# Altium footprint library bspd.PcbLib: 19 footprints (part 1 of 2)
Each footprint in its own frame and in the unit in brackets; x right, y up, seen from the top. Pads: shape width x height; smd on the part's side, far side on the other; paste and mask are expansions set on the pad; w line width, h text height; cw(c..) or ccw(c..) is an arc to the next point about the centre after c.
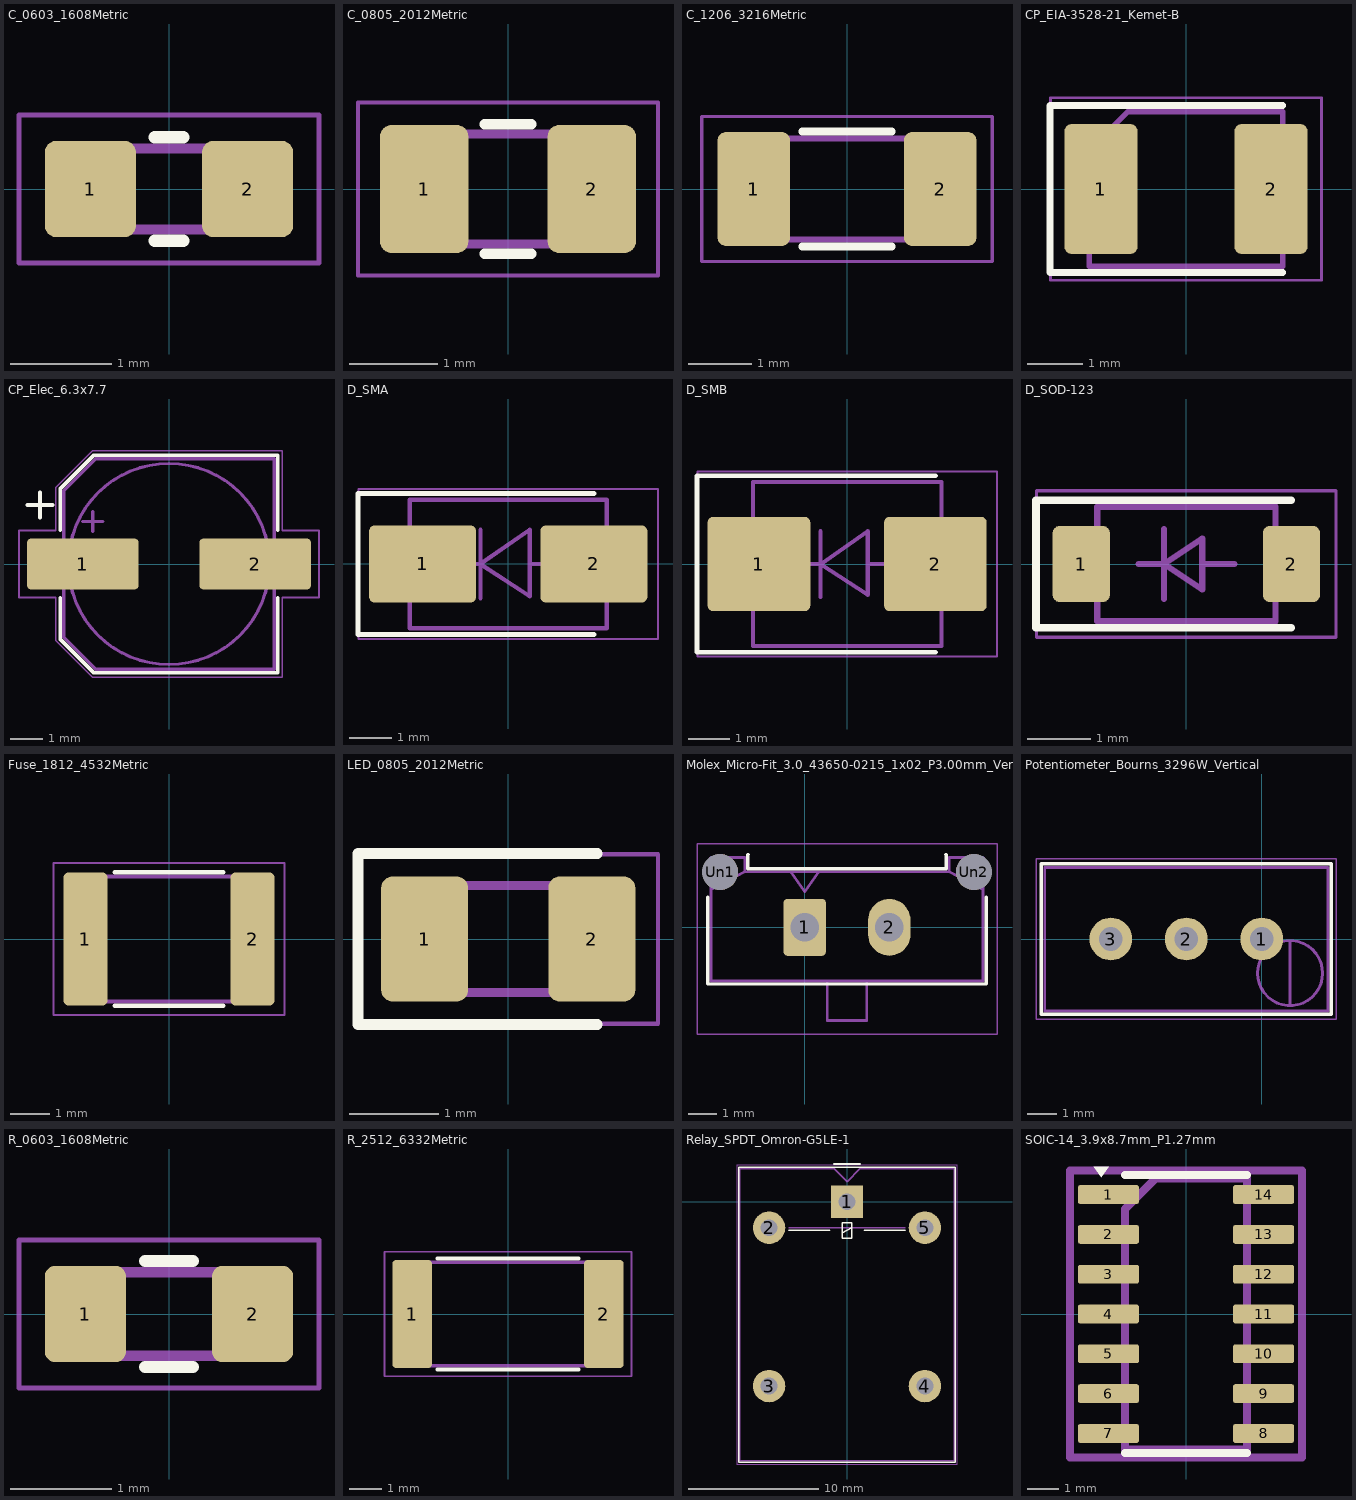
[diagram p0: the footprints below, top view; thin cyan lines are the x and y axes]

## C_0603_1608Metric [mm]
pads (2):
  rrect25% 0.9x0.95 smd: 1(-0.775,0) 2(0.775,0)
F.SilkS:
  lines w0.12: -0.141,-0.51 0.141,-0.51 ; -0.141,0.51 0.141,0.51
F.Fab:
  lines w0.1: -0.8,-0.4 0.8,-0.4 0.8,0.4 -0.8,0.4 -0.8,-0.4
  text "'.Designator'" at -0.963,-0.165 h0.4
F.CrtYd:
  lines w0.05: -1.48,-0.73 -1.48,0.73 1.48,0.73 1.48,-0.73 -1.48,-0.73

## C_0805_2012Metric [mm]
pads (2):
  rrect25% 1x1.45 smd: 1(-0.95,0) 2(0.95,0)
F.SilkS:
  lines w0.12: -0.261,-0.735 0.261,-0.735 ; -0.261,0.735 0.261,0.735
F.Fab:
  lines w0.1: -1,-0.625 -1,0.625 1,0.625 1,-0.625 -1,-0.625
  text "'.Designator'" at -1.209,-0.207 h0.5
F.CrtYd:
  lines w0.05: -1.7,-0.98 1.7,-0.98 1.7,0.98 -1.7,0.98 -1.7,-0.98

## C_1206_3216Metric [mm]
pads (2):
  rrect22% 1.15x1.8 smd: 1(-1.475,0) 2(1.475,0)
F.SilkS:
  lines w0.12: -0.711,-0.91 0.711,-0.91 ; -0.711,0.91 0.711,0.91
F.Fab:
  lines w0.1: -1.6,-0.8 1.6,-0.8 1.6,0.8 -1.6,0.8 -1.6,-0.8
  text "'.Designator'" at -1.932,-0.331 h0.8
F.CrtYd:
  lines w0.05: -2.3,-1.15 -2.3,1.15 2.3,1.15 2.3,-1.15 -2.3,-1.15

## CP_EIA-3528-21_Kemet-B [mm]
pads (2):
  rrect19% 1.325x2.35 smd: 1(-1.538,0) 2(1.538,0)
F.SilkS:
  lines w0.12: 1.75,-1.51 -2.46,-1.51 -2.46,1.51 1.75,1.51
F.Fab:
  lines w0.1: -1.75,-1.4 -1.75,0.7 -1.05,1.4 1.75,1.4 1.75,-1.4 -1.75,-1.4
  text "'.Designator'" at -2.125,-0.364 h0.88
F.CrtYd:
  lines w0.05: -2.45,-1.65 -2.45,1.65 2.45,1.65 2.45,-1.65 -2.45,-1.65

## CP_Elec_6.3x7.7 [mm]
pads (2):
  rrect16% 3.5x1.6 smd: 1(-2.7,0) 2(2.7,0)
F.SilkS:
  lines w0.12: -4.437,1.847 -3.65,1.847 ; -4.044,1.454 -4.044,2.241 ; -3.41,-1.06 -3.41,-2.346 -2.346,-3.41 3.41,-3.41 3.41,-1.06 ; -3.41,1.06 -3.41,2.346 -2.346,3.41 3.41,3.41 3.41,1.06
F.Fab:
  circle w0.1: c0,0 r3.15
  lines w0.1: -2.705,1.33 -2.075,1.33 ; -2.39,1.015 -2.39,1.645 ; -3.3,-2.3 -2.3,-3.3 3.3,-3.3 3.3,3.3 -2.3,3.3 -3.3,2.3 -3.3,-2.3
  text "'.Designator'" at -2.417,-0.414 h1
F.CrtYd:
  lines w0.05: -4.7,-1.05 -4.7,1.05 -3.55,1.05 -3.55,2.4 -2.4,3.55 3.55,3.55 3.55,1.05 4.7,1.05 4.7,-1.05 3.55,-1.05 3.55,-3.55 -2.4,-3.55 -3.55,-2.4 -3.55,-1.05 -4.7,-1.05

## D_SMA [mm]
pads (2):
  rrect14% 2.5x1.8 smd: 1(-2,0) 2(2,0)
F.SilkS:
  lines w0.12: 2,-1.65 -3.51,-1.65 -3.51,1.65 2,1.65
F.Fab:
  lines w0.1: -1.551,-0.001 -0.649,-0.001 ; -0.649,-0.801 -0.649,0.799 ; 0.501,-0.001 1.499,-0.001 ; -0.649,-0.001 0.501,-0.75 0.501,0.799 -0.649,-0.001 ; -2.3,-1.5 2.3,-1.5 2.3,1.5 -2.3,1.5 -2.3,-1.5
  text "'.Designator'" at -2.417,2.086 h1
F.CrtYd:
  lines w0.05: -3.5,-1.75 -3.5,1.75 3.5,1.75 3.5,-1.75 -3.5,-1.75

## D_SMB [mm]
pads (2):
  rrect11% 2.5x2.3 smd: 1(-2.15,0) 2(2.15,0)
F.SilkS:
  lines w0.12: 2.15,-2.15 -3.66,-2.15 -3.66,2.15 2.15,2.15
F.Fab:
  lines w0.1: -1.551,-0.001 -0.649,-0.001 ; -0.649,-0.801 -0.649,0.799 ; 0.501,-0.001 1.499,-0.001 ; -0.649,-0.001 0.501,0.799 0.501,-0.75 -0.649,-0.001 ; -2.3,-2 -2.3,2 2.3,2 2.3,-2 -2.3,-2
  text "'.Designator'" at -2.417,2.586 h1
F.CrtYd:
  lines w0.05: -3.65,-2.25 -3.65,2.25 3.65,2.25 3.65,-2.25 -3.65,-2.25

## D_SOD-123 [mm]
pads (2):
  rrect25% 0.9x1.2 smd: 1(-1.65,0) 2(1.65,0)
F.SilkS:
  lines w0.12: 1.65,-1 -2.36,-1 -2.36,1 1.65,1
F.Fab:
  lines w0.1: -0.75,0 -0.35,0 ; -0.35,-0.55 -0.35,0 ; -0.35,0.55 -0.35,0 ; 0.25,0 0.75,0 ; -0.35,0 0.25,0.4 0.25,-0.4 -0.35,0 ; -1.4,-0.9 -1.4,0.9 1.4,0.9 1.4,-0.9 -1.4,-0.9
  text "'.Designator'" at -2.417,1.586 h1
F.CrtYd:
  lines w0.05: -2.35,-1.15 2.35,-1.15 2.35,1.15 -2.35,1.15 -2.35,-1.15

## Fuse_1812_4532Metric [mm]
pads (2):
  rrect22% 1.125x3.4 smd: 1(-2.137,0) 2(2.137,0)
F.SilkS:
  lines w0.12: -1.386,-1.71 1.386,-1.71 ; -1.386,1.71 1.386,1.71
F.Fab:
  lines w0.1: -2.25,-1.6 2.25,-1.6 2.25,1.6 -2.25,1.6 -2.25,-1.6
  text "'.Designator'" at -2.417,-0.414 h1
F.CrtYd:
  lines w0.05: -2.95,-1.95 2.95,-1.95 2.95,1.95 -2.95,1.95 -2.95,-1.95

## LED_0805_2012Metric [mm]
pads (2):
  rrect25% 0.975x1.4 smd: 1(-0.937,0) 2(0.937,0)
F.SilkS:
  lines w0.12: 1,-0.96 -1.685,-0.96 -1.685,0.96 1,0.96
F.Fab:
  lines w0.1: -1,-0.6 1,-0.6 1,0.6 -0.7,0.6 -1,0.3 -1,-0.6
  text "'.Designator'" at -1.209,-0.207 h0.5
F.CrtYd:
  lines w0.05: -1.68,-0.95 -1.68,0.95 1.68,0.95 1.68,-0.95 -1.68,-0.95

## Molex_Micro-Fit_3.0_43650-0215_1x02_P3.00mm_Vertical [mm]
pads (4):
  rrect17% 1.5x2.02 hole 1.02: 1(0,0)
  rrect100% 1.5x2.02 hole 1.02: 2(3,0)
  round 1.27 hole 1.27: Un1(-3,1.96) Un2(6,1.96)
F.SilkS:
  lines w0.12: -3.435,1.065 -3.435,-2.01 6.435,-2.01 6.435,1.065 ; -1.995,2.58 -2.015,2.58 -2.015,2.08 5.015,2.08 5.015,2.58 4.995,2.58
F.Fab:
  lines w0.1: -3.325,1.34 -2.125,1.97 ; -0.5,1.97 0,1.263 0.5,1.97 ; 0.8,-1.9 0.8,-3.3 2.2,-3.3 2.2,-1.9 ; 6.325,1.34 5.125,1.97 ; -2.125,1.97 5.125,1.97 ; -2.125,1.97 -2.125,2.47 -3.325,2.47 -3.325,-1.9 6.325,-1.9 6.325,2.47 5.125,2.47 5.125,1.97
  text "'.Designator'" at -0.917,-1.614 h1
F.CrtYd:
  lines w0.05: -3.82,-3.8 -3.82,2.97 6.82,2.97 6.82,-3.8 -3.82,-3.8

## Potentiometer_Bourns_3296W_Vertical [mm]
pads (3):
  round 1.44 hole 0.8: 1(0,0) 2(-2.54,0) 3(-5.08,0)
F.SilkS:
  lines w0.12: -7.425,-2.54 -7.425,2.53 2.345,2.53 2.345,-2.54 -7.425,-2.54
F.Fab:
  circle w0.1: c0.955,-1.15 r1.095
  lines w0.1: -7.305,-2.42 -7.305,2.41 2.225,2.41 2.225,-2.42 -7.305,-2.42 ; 0.955,-2.235 0.956,-0.066 0.955,-2.235
  text "'.Designator'" at -5.592,-0.419 h1
F.CrtYd:
  lines w0.05: -7.6,-2.7 2.5,-2.7 2.5,2.7 -7.6,2.7 -7.6,-2.7

## R_0603_1608Metric [mm]
pads (2):
  rrect25% 0.8x0.95 smd: 1(-0.825,0) 2(0.825,0)
F.SilkS:
  lines w0.12: -0.237,-0.523 0.237,-0.523 ; -0.237,0.523 0.237,0.523
F.Fab:
  lines w0.1: -0.8,-0.413 0.8,-0.413 0.8,0.413 -0.8,0.413 -0.8,-0.413
  text "'.Designator'" at -0.963,-0.165 h0.4
F.CrtYd:
  lines w0.05: -1.48,-0.73 -1.48,0.73 1.48,0.73 1.48,-0.73 -1.48,-0.73

## R_2512_6332Metric [mm]
pads (2):
  rrect20% 1.225x3.35 smd: 1(-2.963,0) 2(2.963,0)
F.SilkS:
  lines w0.12: -2.177,-1.71 2.177,-1.71 ; -2.177,1.71 2.177,1.71
F.Fab:
  lines w0.1: -3.15,-1.6 3.15,-1.6 3.15,1.6 -3.15,1.6 -3.15,-1.6
  text "'.Designator'" at -2.417,-0.414 h1
F.CrtYd:
  lines w0.05: -3.82,-1.92 -3.82,1.92 3.82,1.92 3.82,-1.92 -3.82,-1.92

## Relay_SPDT_Omron-G5LE-1 [mm]
pads (5):
  rect 2.5x2.5 hole 1.3: 1(0,0)
  rrect100% 2.5x2.5 hole 1.3: 2(-6,-2) 3(-6,-14.2) 4(6,-14.2) 5(6,-2)
F.SilkS:
  lines w0.12: -4.5,-2.2 -1.35,-2.2 ; -1,2.91 1,2.91 ; -0.35,-2.4 0.35,-2 ; 1.35,-2.2 4.5,-2.2 ; -8.35,-20.05 8.35,-20.05 8.35,2.65 -8.35,2.65 -8.35,-20.05 ; -0.35,-2.8 -0.35,-1.6 0.35,-1.6 0.35,-2.8 -0.35,-2.8
F.Fab:
  lines w0.1: -4.5,-2 4.5,-2 ; -8.25,-19.95 8.25,-19.95 8.25,2.55 1,2.55 0,1.55 -1,2.55 -8.25,2.55 -8.25,-19.95
  text "'.Designator'" at -2.417,-9.114 h1
F.CrtYd:
  lines w0.05: -8.5,-20.2 -8.5,2.8 8.5,2.8 8.5,-20.2 -8.5,-20.2

## SOIC-14_3.9x8.7mm_P1.27mm [mm]
pads (14):
  rrect25% 1.95x0.6 smd: 1(-2.475,3.81) 2(-2.475,2.54) 3(-2.475,1.27) 4(-2.475,0) 5(-2.475,-1.27) 6(-2.475,-2.54) 7(-2.475,-3.81) 8(2.475,-3.81) 9(2.475,-2.54) 10(2.475,-1.27) 11(2.475,0) 12(2.475,1.27) 13(2.475,2.54) 14(2.475,3.81)
F.SilkS:
  region: -2.7,4.37 -2.94,4.7 -2.46,4.7
  lines w0.254: -1.95,-4.435 0,-4.435 1.95,-4.435 ; -1.95,4.435 0,4.435 1.95,4.435
F.Fab:
  lines w0.254: -1.95,-4.325 1.95,-4.325 1.95,4.325 -0.975,4.325 -1.95,3.35 -1.95,-4.325
  text "'.Designator'" at -2.371,-0.406 h0.98
F.CrtYd:
  lines w0.254: -3.7,-4.58 -3.7,4.58 3.7,4.58 3.7,-4.58 -3.7,-4.58